# Altium schematic symbol library Others.SchLib: 3 symbols
Pins are listed as number, name and electrical type; pins without a type are passive.

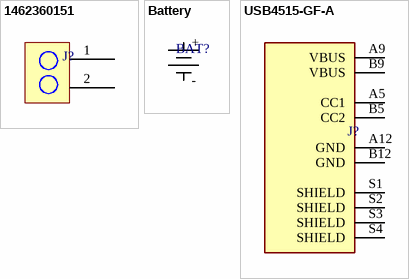
[diagram p0: symbols 1462360151 to USB4515-GF-A]

## 1462360151
designator J?
pins: 1 + (power), 2 - (power)

## Battery
designator BAT?
pins: 1 + (power), 2 - (power)

## USB4515-GF-A
designator J?
pins: A5 CC1, A9 VBUS (power), A12 GND (power), B5 CC2, B9 VBUS (power), B12 GND (power), S1 SHIELD (power), S2 SHIELD (power), S3 SHIELD (power), S4 SHIELD (power)